# Altium footprint library basicfootprints.PcbLib: 522 footprints (part 11 of 33)
Each footprint in its own frame and in the unit in brackets; x right, y up, seen from the top. Pads: shape width x height; smd on the part's side, far side on the other; paste and mask are expansions set on the pad; w line width, h text height; cw(c..) or ccw(c..) is an arc to the next point about the centre after c.
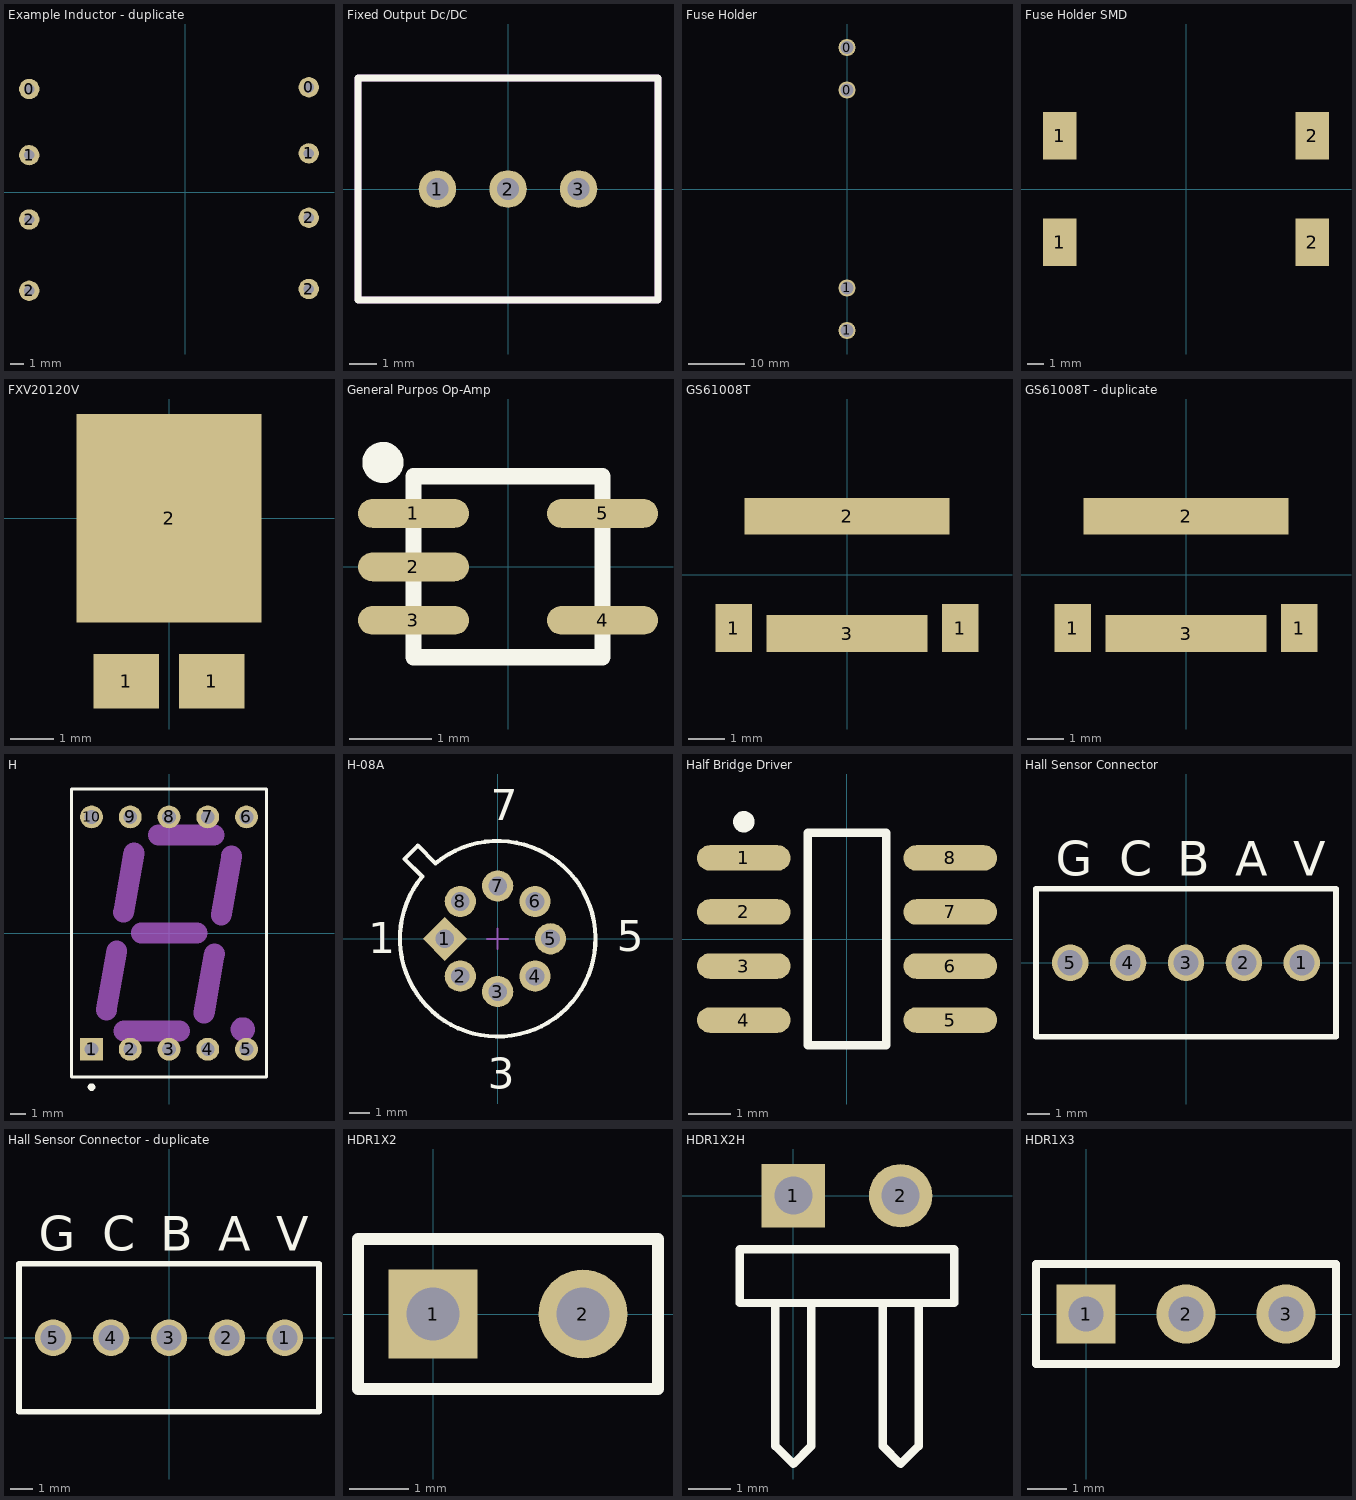
[diagram p10: the footprints below, top view; thin cyan lines are the x and y axes]

## Example Inductor - duplicate [mil] "Coilcraft-FA2890-AL"
pads (8):
  round 60 hole 30: 0(-460,305) 0(365,310) 1(-460,110) 1(365,115) 2(-460,-290) 2(-460,-80) 2(365,-285) 2(365,-75)
3D body "Coilcraft-FA2890-AL.STEP": height 830.71, standoff -127.36, extent -612.05,-497.6 510,527.6

## Fixed Output Dc/DC [mm] "OKI-78SR"
pads (3):
  round 1.35 hole 0.8: 1(-2.54,0) 2(0,0) 3(2.54,0)
Top Overlay:
  lines w0.254: -5.4,-4 -5.4,4 5.4,4 5.4,-4 -5.4,-4
Mechanical 1:
  lines w0.254: -5.4,-4 5.4,-4 5.4,4 -5.4,4 -5.4,-4

## Fuse Holder [mm] "BK/1A1120-09-R  with  BK/ABC-30-R"
pads (4):
  round 3 hole 2.36: 0(0,17.46) 0(0,24.96) 1(0,-24.96) 1(0,-17.46)

## Fuse Holder SMD [mm] "3587"
pads (4):
  rect 2x2.82 smd: 1(-7.5,-3.16) 1(-7.5,3.16) 2(7.5,-3.16) 2(7.5,3.16)
3D body: height 7.37, standoff 0.1, extent -9.779,-3.302 9.906,3.429

## FXV20120V [mm] "Schottky Diode, 20A, 120V"
pads (3):
  rect 1.5x1.25 smd: 1(-0.985,-3.75) 1(0.985,-3.75)
  rect 4.25x4.8 smd: 2(0,0)
3D body: height 1, standoff 0, extent -2.286,-3.937 2.286,2.159

## General Purpos Op-Amp [mm] "LMV321, SC70"
height 1.1
pads (5):
  oval 1.35x0.35 smd: 1(-1.15,0.65) 2(-1.15,0) 3(-1.15,-0.65) 4(1.15,-0.65) 5(1.15,0.65)
Top Overlay:
  circle w0.25: c-1.522,1.27 r0.125
  lines w0.2: -1.15,-1.1 1.15,-1.1 1.15,1.1 -1.15,1.1 -1.15,-1.1
3D body: height 1.1, standoff 0, extent -0.675,-1.1 0.675,1.1

## GS61008T [mm] "GaNFET"
pads (4):
  rect 1x1.3 smd: 1(-3.1,-1.45) 1(3.1,-1.45)
  rect 5.6x1 smd: 2(0,1.6)
  rect 4.4x1 smd: 3(0,-1.6)
3D body: height 0.45, standoff 0.01, extent -3.375,-2.023 3.325,1.377
3D body: height 0.44, standoff 0, extent -3.475,-2.123 3.475,2.032

## GS61008T - duplicate [mm] "GaNFET"
pads (4):
  rect 1x1.3 smd: 1(-3.1,-1.45) 1(3.1,-1.45)
  rect 5.6x1 smd: 2(0,1.6)
  rect 4.4x1 smd: 3(0,-1.6)
3D body: height 0.45, standoff 0.01, extent -3.375,-2.023 3.325,1.377
3D body: height 0.44, standoff 0, extent -3.475,-2.123 3.475,2.032

## H [mm] "LED, 7-Segment Display, 14.2 mm, RHD; 10 Leads; Row Space 15.24 mm; Pitch 2.54 mm"
height 8.25
pads (10):
  rect 1.5x1.5 hole 0.9: 1(-5.08,-7.62)
  round 1.5 hole 0.9: 2(-2.54,-7.62) 3(0,-7.62) 4(2.54,-7.62) 5(5.08,-7.62) 6(5.08,7.62) 7(2.54,7.62) 8(0,7.62) 9(-2.54,7.62) 10(-5.08,7.62)
Top Overlay:
  circle w0.25: c-5.08,-10.1 r0.125
  lines w0.2: -6.4,-9.45 6.4,-9.45 6.4,9.45 -6.4,9.45 -6.4,-9.45
Mechanical 1:
  circle w1: c4.842,-6.316 r0.296
  lines w1.37: -4.108,-5.054 -3.425,-1.17 ; -2.974,1.368 -2.293,5.255 ; -2.958,-6.429 0.692,-6.426 ; -1.821,0 1.828,0 ; -0.689,6.425 2.96,6.425 ; 2.295,-5.256 2.98,-1.371 ; 3.427,1.169 4.11,5.058
Mechanical 13:
  lines w0.1: -6.4,-9.45 -6.4,9.45 6.4,9.45 6.4,-9.45 -6.4,-9.45
3D body: height 8.25, standoff 0, extent -6.4,-9.45 6.4,9.45

## H-08A [mm] "Can; 8 Leads; Pin Circle Dia. 5.08 mm; Lead Dia. 0.53 mm (max)"
height 4.7
pads (8):
  rect 1.5x1.5 hole 0.9 rot 45: 1(-2.54,0)
  round 1.5 hole 0.9: 2(-1.796,-1.796) 3(0,-2.54) 4(1.796,-1.796) 5(2.54,0) 6(1.796,1.796) 7(0,2.54) 8(-1.796,1.796)
Top Overlay:
  lines w0.2: -4.475,3.838 -3.626,2.99 ccw(c0,0) -2.99,3.626 -3.838,4.475 -4.475,3.838
  text "7" at -0.332,5.7 h1.5
  text "5" at 5.712,-0.589 h1.5
  text "3" at -0.469,-7.22 h1.5
  text "1" at -6.22,-0.696 h1.5
Mechanical 15:
  lines w0.1: -0.5,0 0.5,0 ; 0,-0.5 0,0.5

## Half Bridge Driver [mm] "LM5104, 8-SOIC"
height 1.75
pads (8):
  oval 2.2x0.6 smd: 1(-2.425,1.905) 2(-2.425,0.635) 3(-2.425,-0.635) 4(-2.425,-1.905) 5(2.425,-1.905) 6(2.425,-0.635) 7(2.425,0.635) 8(2.425,1.905)
Top Overlay:
  circle w0.25: c-2.425,2.755 r0.125
  lines w0.2: -0.925,-2.5 0.925,-2.5 0.925,2.5 -0.925,2.5 -0.925,-2.5
3D body: height 1.75, standoff 0.1, extent -2,-2.5 2,2.5

## Hall Sensor Connector [mm] "Phoenix 5-terminal Block Screw connector"
pads (5):
  round 1.6 hole 1.1: 1(5.08,0) 2(2.54,0) 3(0,0) 4(-2.54,0) 5(-5.08,0)
Top Overlay:
  lines w0.254: -6.58,-3.25 6.58,-3.25 6.58,3.25 -6.58,3.25 -6.58,-3.25
  text "G" at -5.715,3.81 h1.52
  text "A" at 2.159,3.81 h1.52
  text "V" at 4.699,3.81 h1.52
  text "B" at -0.381,3.81 h1.52
  text "C" at -2.921,3.81 h1.52
3D body "13999.stp": height 3.5, standoff -8.5, extent -6.731,-3.175 6.429,3.025

## Hall Sensor Connector - duplicate [mm] "Phoenix 5-terminal Block Screw connector"
pads (5):
  round 1.6 hole 1.1: 1(5.08,0) 2(2.54,0) 3(0,0) 4(-2.54,0) 5(-5.08,0)
Top Overlay:
  lines w0.254: -6.58,-3.25 6.58,-3.25 6.58,3.25 -6.58,3.25 -6.58,-3.25
  text "G" at -5.715,3.81 h1.52
  text "A" at 2.159,3.81 h1.52
  text "V" at 4.699,3.81 h1.52
  text "B" at -0.381,3.81 h1.52
  text "C" at -2.921,3.81 h1.52
3D body "13999.stp": height 3.5, standoff -8.5, extent -6.731,-3.175 6.429,3.025

## HDR1X2 [mm] "Connector; Header; 2 Position"
pads (2):
  rect 1.5x1.5 hole 0.9: 1(0,0)
  round 1.5 hole 0.9: 2(2.54,0)
Top Overlay:
  lines w0.2: -1.27,-1.27 -1.27,1.27 3.81,1.27 3.81,-1.27 -1.27,-1.27

## HDR1X2H [mm] "Connector; Header; 2 Position; Right Angle"
pads (2):
  rect 1.5x1.5 hole 0.9: 1(0,0)
  round 1.5 hole 0.9: 2(2.54,0)
Top Overlay:
  lines w0.2: -0.423,-2.54 -0.423,-5.927 0,-6.35 0.423,-5.927 0.423,-2.54 ; 2.117,-2.54 2.117,-5.927 2.54,-6.35 2.963,-5.927 2.963,-2.54 ; -1.27,-2.54 3.81,-2.54 3.81,-1.27 -1.27,-1.27 -1.27,-2.54

## HDR1X3 [mm] "Connector; Header; 3 Position"
pads (3):
  rect 1.5x1.5 hole 0.9: 1(0,0)
  round 1.5 hole 0.9: 2(2.54,0) 3(5.08,0)
Top Overlay:
  lines w0.2: -1.27,-1.27 -1.27,1.27 6.35,1.27 6.35,-1.27 -1.27,-1.27